# Altium footprint library PCB_V2.PcbLib: 82 footprints (part 4 of 6)
Each footprint in its own frame and in the unit in brackets; x right, y up, seen from the top. Pads: shape width x height; smd on the part's side, far side on the other; paste and mask are expansions set on the pad; w line width, h text height; cw(c..) or ccw(c..) is an arc to the next point about the centre after c.
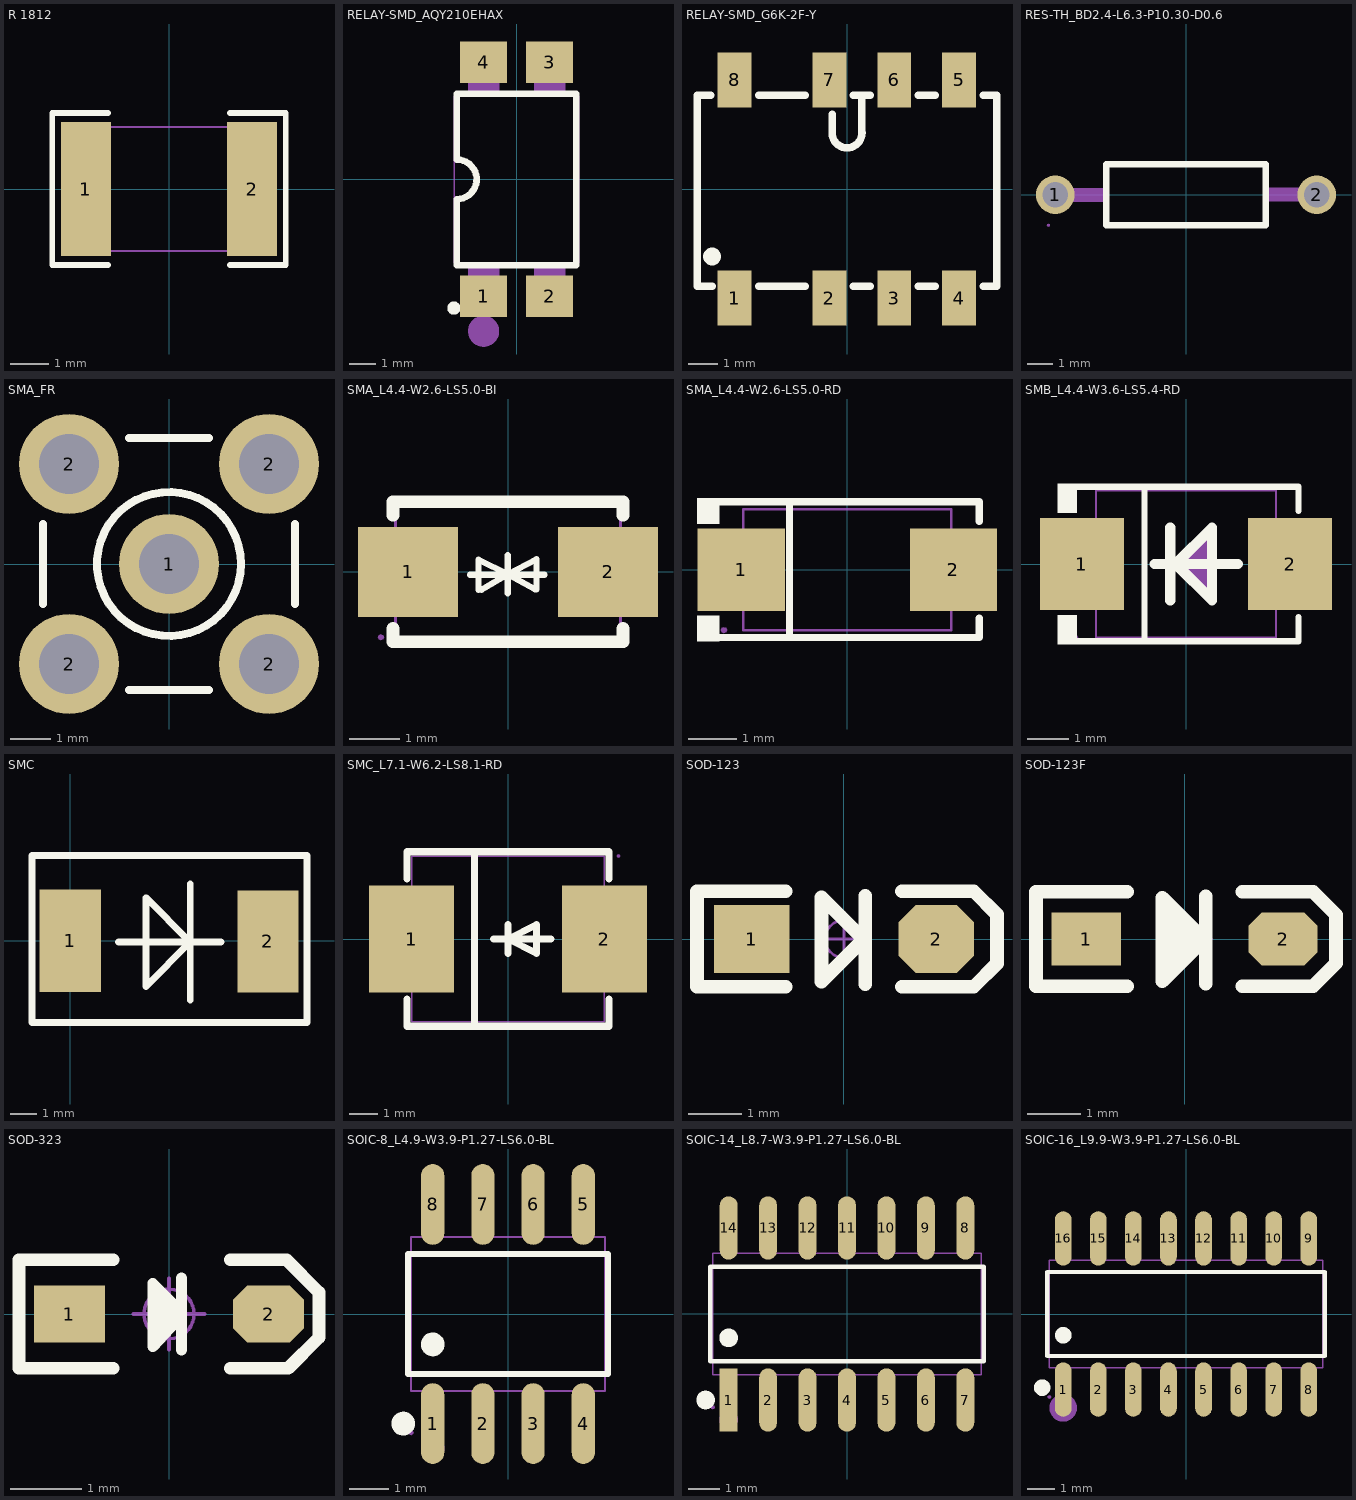
[diagram p3: the footprints below, top view; thin cyan lines are the x and y axes]

## R 1812 [mm]
pads (2):
  rect 1.283x3.456 smd paste-100 mask+0.051: 1(-2.141,0) 2(2.141,0)
Top Overlay:
  lines w0.152: -1.576,-1.957 -3.011,-1.957 -3.011,1.957 -1.576,1.957 ; 1.576,-1.957 3.011,-1.957 3.011,1.957 1.576,1.957
Top Paste:
  region: 1.5,-1.628 1.5,-0.688 1.6,-0.588 1.836,-0.588 1.936,-0.488 1.936,0.488 1.836,0.588 1.6,0.588 1.5,0.688 1.5,1.628 1.6,1.728 2.683,1.728 2.783,1.628 2.783,-1.628 2.683,-1.728 1.6,-1.728
  region: -1.5,-1.628 -1.5,-0.688 -1.6,-0.588 -1.836,-0.588 -1.936,-0.488 -1.936,0.488 -1.836,0.588 -1.6,0.588 -1.5,0.688 -1.5,1.628 -1.6,1.728 -2.683,1.728 -2.783,1.628 -2.783,-1.628 -2.683,-1.728 -1.6,-1.728
Mechanical 15:
  region: -2.186,-1.6 -2.204,-1.556 -2.25,-1.537 -2.296,-1.556 -2.314,-1.6 -2.296,-1.644 -2.25,-1.663 -2.204,-1.644 -2.186,-1.6
  region: -2.25,-1.6 -2.25,1.6 -1.75,1.6 -1.75,-1.6
  region: 2.25,-1.6 2.25,1.6 1.75,1.6 1.75,-1.6
  lines w0.051: -2.25,-1.6 -2.25,1.6 2.25,1.6 2.25,-1.6 -2.25,-1.6

## RELAY-SMD_AQY210EHAX [mm]
pads (4):
  rect 1.8x1.6 smd: 1(-1.27,-4.5) 2(1.27,-4.5) 3(1.27,4.5) 4(-1.27,4.5)
Top Overlay:
  circle w0.254: c-2.413,-4.953 r0.127
  lines w0.254: -2.301,-0.762 ccw(c-2.301,0) -2.3,0.762 -2.3,3.3 2.3,3.3 2.3,-3.3 -2.3,-3.3 -2.3,-0.762
Mechanical 6:
  circle w0.6: c-1.27,-5.842 r0.3
Mechanical 15:
  region: -2.335,-5 -2.354,-4.954 -2.4,-4.935 -2.446,-4.954 -2.465,-5 -2.446,-5.046 -2.4,-5.065 -2.354,-5.046
  region: -1.87,3.19 -1.87,4.01 -0.67,4.01 -0.67,3.19
  region: -1.87,4 -1.87,5 -0.67,5 -0.67,4
  region: 0.67,3.19 0.67,4.01 1.87,4.01 1.87,3.19
  region: 0.67,4 0.67,5 1.87,5 1.87,4
  region: 0.67,-4.01 0.67,-3.19 1.87,-3.19 1.87,-4.01
  region: 0.67,-5 0.67,-4 1.87,-4 1.87,-5
  region: -1.87,-4.01 -1.87,-3.19 -0.67,-3.19 -0.67,-4.01
  region: -1.87,-5 -1.87,-4 -0.67,-4 -0.67,-5
  lines w0.051: -2.4,-3.2 2.4,-3.2 2.4,3.2 -2.4,3.2 -2.4,-3.2

## RELAY-SMD_G6K-2F-Y [mm]
pads (8):
  rect 1.15x1.85 smd: 1(-3.81,-3.692) 2(-0.6,-3.692) 3(1.6,-3.692) 4(3.8,-3.692) 5(3.8,3.692) 6(1.6,3.692) 7(-0.6,3.692) 8(-3.81,3.692)
Top Overlay:
  circle w0.3: c-4.572,-2.286 r0.15
  lines w0.254: -4.606,3.175 -5.08,3.175 -5.08,-3.175 -5.08,-3.302 -4.572,-3.302 ; -2.994,-3.302 -1.406,-3.302 ; -2.994,3.175 -1.406,3.175 ; -0.508,2.536 -0.508,1.905 ccw(c0,1.905) 0,1.397 ccw(c0,1.905) 0.508,1.905 0.508,3.048 ; 0.206,-3.302 0.794,-3.302 ; 0.206,3.175 0.794,3.175 ; 2.406,-3.302 2.994,-3.302 ; 2.406,3.175 2.994,3.175 ; 4.606,-3.302 5.08,-3.302 5.08,3.175 4.606,3.175

## RES-TH_BD2.4-L6.3-P10.30-D0.6 [mm]
pads (2):
  round 1.524 hole 1: 1(-5.15,0) 2(5.15,0)
Top Overlay:
  lines w0.254: -3.15,-1.2 3.15,-1.2 3.15,1.2 -3.15,1.2 -3.15,-1.2
Mechanical 15:
  region: -5.361,-1.2 -5.379,-1.155 -5.425,-1.136 -5.471,-1.155 -5.49,-1.2 -5.471,-1.245 -5.425,-1.264 -5.379,-1.245
  region: 5.429,0 5.409,0.102 5.348,0.193 5.257,0.254 5.15,0.275 5.043,0.254 4.952,0.193 4.891,0.102 4.871,0 4.891,-0.102 4.952,-0.193 5.043,-0.254 5.15,-0.275 5.257,-0.254 5.348,-0.193 5.409,-0.102
  region: -4.871,0 -4.891,0.102 -4.952,0.193 -5.043,0.254 -5.15,0.275 -5.257,0.254 -5.348,0.193 -5.409,0.102 -5.429,0 -5.409,-0.102 -5.348,-0.193 -5.257,-0.254 -5.15,-0.275 -5.043,-0.254 -4.952,-0.193 -4.891,-0.102
  region: -5.42,0.275 -3.09,0.26 -3.09,-0.29 -5.425,-0.274
  region: 3.098,0.282 5.428,0.268 5.428,-0.282 3.092,-0.266
  lines w0.051: -3.15,-1.2 -3.15,1.2 3.15,1.2 3.15,-1.2 -3.15,-1.2

## SMA_FR [mm]
height 8
pads (5):
  round 2.5 hole 1.5: 1(0,0) 2(-2.5,-2.5) 2(-2.5,2.5) 2(2.5,-2.5) 2(2.5,2.5)
Top Overlay:
  circle w0.2: c0,0 r1.8
  lines w0.2: -3.15,-1 -3.15,1 ; -1,-3.15 1,-3.15 ; -1,3.15 1,3.15 ; 3.15,-1 3.15,1
Mechanical 1:
  circle w0.025: c0,0 r0.2
  circle w0.025: c0,0 r1.05
  circle w0.025: c0,0 r1.8
3D body: height 10.26, standoff -3.84, extent -3.5,-3.5 3.5,11.6

## SMA_L4.4-W2.6-LS5.0-BI [mm]
pads (2):
  rect 2x1.8 smd: 1(-2,0) 2(2,0)
Top Overlay:
  lines w0.127: -0.76,-0.06 0.73,-0.06 ; -0.59,-0.36 -0.59,0.24 -0.002,-0.049 ; -0.53,-0.36 -0.002,-0.049 ; -0.002,-0.43 -0.002,-0.049 ; -0.002,0.332 -0.002,-0.049 ; 0.54,-0.35 -0.002,-0.049 ; 0.57,-0.35 0.57,0.25 -0.002,-0.049
  lines w0.254: -2.3,-1.131 -2.3,-1.4 2.3,-1.4 2.3,-1.131 ; -2.3,1.131 -2.3,1.4 2.3,1.4 2.3,1.131
Mechanical 15:
  region: 1.458,-0.725 1.458,0.725 2.542,0.725 2.542,-0.725
  region: -2.542,-0.725 -2.542,0.725 -1.458,0.725 -1.458,-0.725
  region: -2.478,-1.308 -2.497,-1.263 -2.543,-1.244 -2.588,-1.263 -2.607,-1.307 -2.607,-1.308 -2.588,-1.352 -2.543,-1.371 -2.497,-1.352
  lines w0.051: -2.25,-1.308 2.25,-1.308 2.25,1.307 -2.25,1.307 -2.25,-1.308

## SMA_L4.4-W2.6-LS5.0-RD [mm]
pads (2):
  rect 1.8x1.7 smd: 1(-2.193,0) 2(2.193,0)
Top Overlay:
  region: -2.65,-1.477 -2.65,-0.949 -3.107,-0.949 -3.107,-1.477
  region: -2.65,1.477 -2.65,0.949 -3.107,0.949 -3.107,1.477
  lines w0.152: -2.726,-1.401 2.726,-1.401 2.726,-1 ; -2.726,1.401 2.726,1.401 2.726,1 ; -1.197,-1.401 -1.197,1.401
Mechanical 6:
  region: 2.153,-0.663 2.153,0.663 1.954,0.663 1.954,-0.663
  region: 2.451,-0.099 2.451,0.099 1.656,0.099 1.656,-0.099
  region: -2.451,-0.099 -2.451,0.099 -1.656,0.099 -1.656,-0.099
Mechanical 15:
  region: 1.35,-0.725 1.35,0.725 2.55,0.725 2.55,-0.725
  region: -1.35,0.725 -1.35,-0.725 -2.55,-0.725 -2.55,0.725
  region: -2.485,-1.25 -2.504,-1.204 -2.55,-1.185 -2.596,-1.204 -2.615,-1.25 -2.596,-1.296 -2.55,-1.315 -2.504,-1.296
  lines w0.051: -2.15,-1.25 2.15,-1.25 2.15,1.25 -2.15,1.25 -2.15,-1.25

## SMB_L4.4-W3.6-LS5.4-RD [mm]
pads (2):
  rect 2.047x2.241 smd: 1(-2.54,0) 2(2.54,0)
Top Overlay:
  region: -2.668,1.962 -2.668,1.249 -3.125,1.249 -3.125,1.962
  region: -2.668,-1.962 -2.668,-1.249 -3.125,-1.249 -3.125,-1.962
  lines w0.152: -2.744,-1.886 2.744,-1.886 2.744,-1.299 ; -2.744,1.886 2.744,1.886 2.744,1.299 ; -1.016,-1.886 -1.016,1.886
  lines w0.254: -0.762,0 1.27,0 ; -0.381,-0.889 -0.381,0.889 ; -0.366,0 -0.254,0 ; -0.328,0 -0.254,0 ; -0.254,0 0.635,-0.889 0.635,0.889 -0.254,0
Mechanical 6:
  region: 0.635,-0.889 0.635,0.889 -0.254,0
  region: 2.554,-0.907 2.554,0.903 2.283,0.903 2.283,-0.907
  region: 2.961,-0.138 2.961,0.134 1.875,0.134 1.875,-0.138
  region: -3.248,-0.098 -3.248,0.174 -2.162,0.174 -2.162,-0.098
Mechanical 15:
  region: 1.558,1.05 2.698,1.05 2.698,-1.05 1.558,-1.05
  region: -2.698,1.05 -1.558,1.05 -1.558,-1.05 -2.698,-1.05
  region: -2.633,-1.8 -2.652,-1.754 -2.698,-1.735 -2.744,-1.754 -2.763,-1.8 -2.744,-1.846 -2.698,-1.865 -2.652,-1.846 -2.633,-1.8
  lines w0.051: -2.2,-1.8 2.2,-1.8 2.2,1.8 -2.2,1.8 -2.2,-1.8

## SMC [mil]
pads (2):
  rect 90x149.84 smd: 1(0,0)
  rect 90x149.63 smd: 2(290,-1)
Top Overlay:
  lines w10: 71,-2 221,-2 ; 176,-87 176,83 ; -56,-120 347,-120 347,125 -56,125 -56,-120 ; 111,-67 111,63 176,-2 111,-67
3D body: height 106.3, standoff 0, extent -14.84,-117.09 304.84,127

## SMC_L7.1-W6.2-LS8.1-RD [mm]
pads (2):
  rect 3.03x3.82 smd: 1(-3.435,0) 2(3.435,0)
Top Overlay:
  lines w0.254: -3.6,-2.141 -3.6,-3.11 3.6,-3.11 3.6,-2.141 ; -3.6,2.141 -3.6,3.11 3.6,3.11 3.6,2.141 ; -1.192,-3.11 -1.192,3.11 ; -0.508,0 1.524,0 ; 0,0.508 0,-0.508 0,0 ; 0,0 1.016,0.508 1.016,-0.508 0,0
Mechanical 6:
  region: 2.54,0.254 4.318,0.254 4.318,-0.254 2.54,-0.254
  region: 3.181,-0.895 3.181,0.883 3.689,0.883 3.689,-0.895
  region: -4.33,0.254 -2.552,0.254 -2.552,-0.254 -4.33,-0.254
Mechanical 15:
  region: -2.928,-1.475 -3.943,-1.475 -3.943,1.475 -2.928,1.475
  region: 2.928,1.475 3.943,1.475 3.943,-1.475 2.928,-1.475
  region: 4.008,2.952 3.989,2.998 3.943,3.017 3.897,2.998 3.878,2.952 3.897,2.906 3.943,2.887 3.989,2.906 4.008,2.952
  lines w0.051: -3.428,-2.952 -3.428,2.952 3.428,2.952 3.428,-2.952 -3.428,-2.952

## SOD-123 [mil] "2.7x1.6X"
pads (2):
  rect 55x50 smd: 1(-67.5,0)
  oct 55x50 smd: 2(67.5,0)
Top Overlay:
  lines w10: -42.5,-35 -107.5,-35 -107.5,35 -42.5,35 ; 14,-0.8 -16.4,-31.2 -16.4,30.5 15.6,-1.5 ; 15.6,-33.1 15.6,31.7 ; 42.5,-35 95,-35 112,-18 112,18 95,35 42.5,35
Mechanical 15:
  circle w1.97: c0,0 r13.78
  lines w1.97: -19.68,0 19.68,0 ; 0,-19.68 0,19.68
3D body: height 48.03, standoff 0, extent -72.84,-31.5 72.83,31.5

## SOD-123F [mm] "2.7x"
pads (2):
  rect 1.3x1 smd: 1(-1.85,0)
  oct 1.3x1 smd: 2(1.85,0)
Top Overlay:
  lines w0.254: -1.079,-0.889 -2.794,-0.889 -2.794,0.889 -1.079,0.889 ; -0.254,0.559 -0.229,-0.432 0.254,0 0,0.254 0,0 0,-0.254 ; 0.356,-0.02 -0.417,-0.792 -0.417,0.775 0.396,-0.038 ; 0.396,-0.841 0.396,0.805 ; 1.079,-0.889 2.413,-0.889 2.845,-0.457 2.845,0.457 2.413,0.889 1.079,0.889
Mechanical 15:
  circle w0.05: c0,0 r0.35
  lines w0.05: -0.5,0 0.5,0 ; 0,-0.5 0,0.5
3D body: height 1.15, standoff 0.04, extent -1.9,-0.8 1.9,0.8

## SOD-323 [mm]
height 2.54
pads (2):
  rect 1x0.8 smd: 1(-1.4,0)
  oct 1x0.8 smd: 2(1.4,0)
Top Overlay:
  lines w0.152: 0.178,-0.508 0.178,0.508 ; 0.178,-0.025 -0.229,-0.457 -0.229,0.432 0.178,0.025
  lines w0.178: -0.787,-0.762 -2.108,-0.762 -2.108,0.762 -0.787,0.762 ; 0.864,-0.762 1.676,-0.762 2.108,-0.33 2.108,0.305 1.651,0.762 0.864,0.762
  lines w0.254: -0.127,0.254 -0.152,-0.178 0.025,-0.025 -0.025,0.127
Mechanical 15:
  circle w0.05: c0,0 r0.35
  lines w0.05: -0.5,0 0.5,0 ; 0,-0.5 0,0.5
3D body: height 1, standoff 0.04, extent -1.337,-0.631 1.311,0.669

## SOIC-8_L4.9-W3.9-P1.27-LS6.0-BL [mm]
pads (8):
  oval 0.588x2.045 smd: 1(-1.905,-2.772) 2(-0.635,-2.772) 3(0.635,-2.772) 4(1.905,-2.772) 5(1.905,2.772) 6(0.635,2.772) 7(-0.635,2.772) 8(-1.905,2.772)
Top Overlay:
  circle w0.3: c-1.905,-0.769 r0.15
  circle w0.3: c-2.652,-2.772 r0.15
  lines w0.152: -2.526,-1.521 -2.526,1.521 2.526,1.521 2.526,-1.521 -2.526,-1.521
Mechanical 6:
  circle w0.3: c-1.905,-3.4 r0.15
Mechanical 15:
  region: -2.386,-3 -2.404,-2.955 -2.45,-2.936 -2.496,-2.955 -2.514,-3 -2.496,-3.045 -2.45,-3.064 -2.404,-3.045
  region: -2.115,-3 -2.115,-2.165 -1.695,-2.165 -1.695,-3
  region: -2.115,-2.175 -2.115,-1.94 -1.695,-1.94 -1.695,-2.175
  region: -0.845,-3 -0.845,-2.165 -0.425,-2.165 -0.425,-3
  region: -0.845,-2.175 -0.845,-1.94 -0.425,-1.94 -0.425,-2.175
  region: 0.425,-3 0.425,-2.165 0.845,-2.165 0.845,-3
  region: 0.425,-2.175 0.425,-1.94 0.845,-1.94 0.845,-2.175
  region: 1.695,-3 1.695,-2.165 2.115,-2.165 2.115,-3
  region: 1.695,-2.175 1.695,-1.94 2.115,-1.94 2.115,-2.175
  region: -2.115,3 -2.115,2.165 -1.695,2.165 -1.695,3
  region: -2.115,2.175 -2.115,1.94 -1.695,1.94 -1.695,2.175
  region: -0.845,3 -0.845,2.165 -0.425,2.165 -0.425,3
  region: -0.845,2.175 -0.845,1.94 -0.425,1.94 -0.425,2.175
  region: 0.425,3 0.425,2.165 0.845,2.165 0.845,3
  region: 0.425,2.175 0.425,1.94 0.845,1.94 0.845,2.175
  region: 1.695,3 1.695,2.165 2.115,2.165 2.115,3
  region: 1.695,2.175 1.695,1.94 2.115,1.94 2.115,2.175
  lines w0.051: -2.45,-1.95 -2.45,1.95 2.45,1.95 2.45,-1.95 -2.45,-1.95

## SOIC-14_L8.7-W3.9-P1.27-LS6.0-BL [mm]
pads (14):
  rect 0.574x2.038 smd: 1(-3.81,-2.769)
  oval 0.574x2.038 smd: 2(-2.54,-2.769) 3(-1.27,-2.769) 4(0,-2.769) 5(1.27,-2.769) 6(2.54,-2.769) 7(3.81,-2.769) 8(3.81,2.769) 9(2.54,2.769) 10(1.27,2.769) 11(0,2.769) 12(-1.27,2.769) 13(-2.54,2.769) 14(-3.81,2.769)
Top Overlay:
  circle w0.3: c-3.81,-0.769 r0.15
  circle w0.3: c-4.549,-2.769 r0.15
  lines w0.152: -4.401,-1.521 -4.401,1.521 4.401,1.521 4.401,-1.521 -4.401,-1.521
Mechanical 6:
  circle w0.3: c-3.81,-3.4 r0.15
Mechanical 15:
  region: -4.261,-3 -4.279,-2.955 -4.325,-2.936 -4.371,-2.955 -4.389,-3 -4.371,-3.045 -4.325,-3.064 -4.279,-3.045
  region: -4.015,-3 -4.015,-2.165 -3.605,-2.165 -3.605,-3
  region: -4.015,-2.175 -4.015,-1.94 -3.605,-1.94 -3.605,-2.175
  region: -2.745,-3 -2.745,-2.165 -2.335,-2.165 -2.335,-3
  region: -2.745,-2.175 -2.745,-1.94 -2.335,-1.94 -2.335,-2.175
  region: -1.475,-3 -1.475,-2.165 -1.065,-2.165 -1.065,-3
  region: -1.475,-2.175 -1.475,-1.94 -1.065,-1.94 -1.065,-2.175
  region: -0.205,-3 -0.205,-2.165 0.205,-2.165 0.205,-3
  region: -0.205,-2.175 -0.205,-1.94 0.205,-1.94 0.205,-2.175
  region: 1.065,-3 1.065,-2.165 1.475,-2.165 1.475,-3
  region: 1.065,-2.175 1.065,-1.94 1.475,-1.94 1.475,-2.175
  region: 2.335,-3 2.335,-2.165 2.745,-2.165 2.745,-3
  region: 2.335,-2.175 2.335,-1.94 2.745,-1.94 2.745,-2.175
  region: 3.605,-3 3.605,-2.165 4.015,-2.165 4.015,-3
  region: 3.605,-2.175 3.605,-1.94 4.015,-1.94 4.015,-2.175
  region: -4.015,3 -4.015,2.165 -3.605,2.165 -3.605,3
  region: -4.015,2.175 -4.015,1.94 -3.605,1.94 -3.605,2.175
  region: -2.745,3 -2.745,2.165 -2.335,2.165 -2.335,3
  region: -2.745,2.175 -2.745,1.94 -2.335,1.94 -2.335,2.175
  region: -1.475,3 -1.475,2.165 -1.065,2.165 -1.065,3
  region: -1.475,2.175 -1.475,1.94 -1.065,1.94 -1.065,2.175
  region: -0.205,3 -0.205,2.165 0.205,2.165 0.205,3
  region: -0.205,2.175 -0.205,1.94 0.205,1.94 0.205,2.175
  region: 1.065,3 1.065,2.165 1.475,2.165 1.475,3
  region: 1.065,2.175 1.065,1.94 1.475,1.94 1.475,2.175
  region: 2.335,3 2.335,2.165 2.745,2.165 2.745,3
  region: 2.335,2.175 2.335,1.94 2.745,1.94 2.745,2.175
  region: 3.605,3 3.605,2.165 4.015,2.165 4.015,3
  region: 3.605,2.175 3.605,1.94 4.015,1.94 4.015,2.175
  lines w0.051: -4.325,-1.95 -4.325,1.95 4.325,1.95 4.325,-1.95 -4.325,-1.95

## SOIC-16_L9.9-W3.9-P1.27-LS6.0-BL [mm]
pads (16):
  oval 0.602x1.971 smd: 1(-4.445,-2.736) 2(-3.175,-2.736) 3(-1.905,-2.736) 4(-0.635,-2.736) 5(0.635,-2.736) 6(1.905,-2.736) 7(3.175,-2.736) 8(4.445,-2.736) 9(4.445,2.736) 10(3.175,2.736) 11(1.905,2.736) 12(0.635,2.736) 13(-0.635,2.736) 14(-1.905,2.736) 15(-3.175,2.736) 16(-4.445,2.736)
Top Overlay:
  circle w0.3: c-5.207,-2.667 r0.15
  circle w0.3: c-4.445,-0.769 r0.15
  lines w0.152: -5.026,-1.521 5.026,-1.521 5.026,1.521 -5.026,1.521 -5.026,-1.521
Mechanical 6:
  circle w0.5: c-4.445,-3.4 r0.25
Mechanical 15:
  region: 4.23,2.31 4.23,1.94 4.66,1.94 4.66,2.31
  region: 4.23,3 4.23,2.3 4.66,2.3 4.66,3
  region: 2.96,2.31 2.96,1.94 3.39,1.94 3.39,2.31
  region: 2.96,3 2.96,2.3 3.39,2.3 3.39,3
  region: 1.69,2.31 1.69,1.94 2.12,1.94 2.12,2.31
  region: 1.69,3 1.69,2.3 2.12,2.3 2.12,3
  region: 0.42,2.31 0.42,1.94 0.85,1.94 0.85,2.31
  region: 0.42,3 0.42,2.3 0.85,2.3 0.85,3
  region: -0.85,2.31 -0.85,1.94 -0.42,1.94 -0.42,2.31
  region: -0.85,3 -0.85,2.3 -0.42,2.3 -0.42,3
  region: -2.12,2.31 -2.12,1.94 -1.69,1.94 -1.69,2.31
  region: -2.12,3 -2.12,2.3 -1.69,2.3 -1.69,3
  region: -3.39,2.31 -3.39,1.94 -2.96,1.94 -2.96,2.31
  region: -3.39,3 -3.39,2.3 -2.96,2.3 -2.96,3
  region: -4.66,2.31 -4.66,1.94 -4.23,1.94 -4.23,2.31
  region: -4.66,3 -4.66,2.3 -4.23,2.3 -4.23,3
  region: 4.23,-2.31 4.23,-1.94 4.66,-1.94 4.66,-2.31
  region: 4.23,-3 4.23,-2.3 4.66,-2.3 4.66,-3
  region: 2.96,-2.31 2.96,-1.94 3.39,-1.94 3.39,-2.31
  region: 2.96,-3 2.96,-2.3 3.39,-2.3 3.39,-3
  region: 1.69,-2.31 1.69,-1.94 2.12,-1.94 2.12,-2.31
  region: 1.69,-3 1.69,-2.3 2.12,-2.3 2.12,-3
  region: 0.42,-2.31 0.42,-1.94 0.85,-1.94 0.85,-2.31
  region: 0.42,-3 0.42,-2.3 0.85,-2.3 0.85,-3
  region: -0.85,-2.31 -0.85,-1.94 -0.42,-1.94 -0.42,-2.31
  region: -0.85,-3 -0.85,-2.3 -0.42,-2.3 -0.42,-3
  region: -2.12,-2.31 -2.12,-1.94 -1.69,-1.94 -1.69,-2.31
  region: -2.12,-3 -2.12,-2.3 -1.69,-2.3 -1.69,-3
  region: -3.39,-2.31 -3.39,-1.94 -2.96,-1.94 -2.96,-2.31
  region: -3.39,-3 -3.39,-2.3 -2.96,-2.3 -2.96,-3
  region: -4.66,-2.31 -4.66,-1.94 -4.23,-1.94 -4.23,-2.31
  region: -4.66,-3 -4.66,-2.3 -4.23,-2.3 -4.23,-3
  region: -4.886,-3 -4.904,-2.955 -4.95,-2.936 -4.996,-2.955 -5.014,-3 -4.996,-3.045 -4.95,-3.064 -4.904,-3.045
  lines w0.051: -4.95,-1.95 4.95,-1.95 4.95,1.95 -4.95,1.95 -4.95,-1.95